# Altium schematic symbol library Schlib1.SchLib: 7 symbols
Pins are listed as number, name and electrical type; pins without a type are passive.

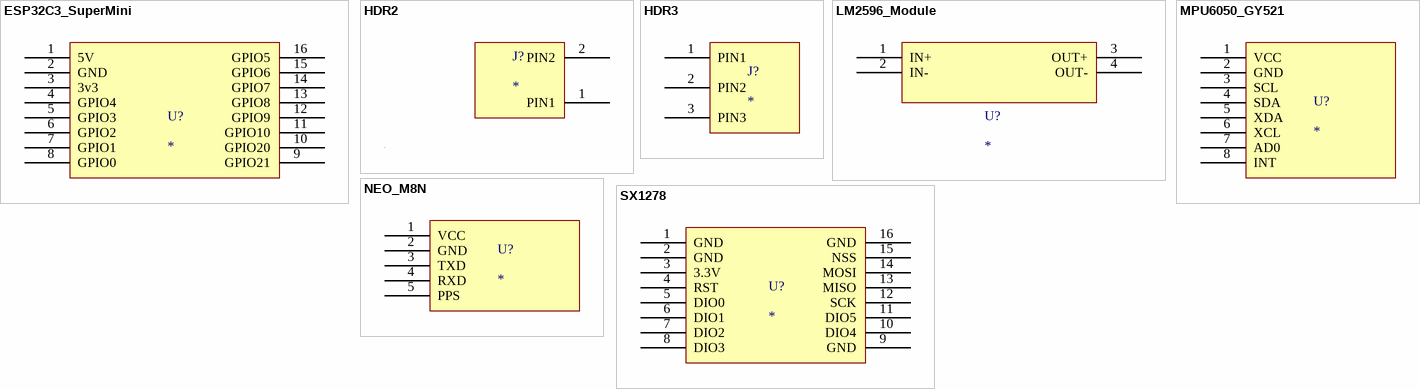
[diagram p0: symbols ESP32C3_SuperMini to SX1278]

## ESP32C3_SuperMini
designator U?
pins: 1 5V, 2 GND, 3 3v3, 4 GPIO4, 5 GPIO3, 6 GPIO2, 7 GPIO1, 8 GPIO0, 9 GPIO21, 10 GPIO20, 11 GPIO10, 12 GPIO9, 13 GPIO8, 14 GPIO7, 15 GPIO6, 16 GPIO5

## HDR2
designator J?
pins: 1 PIN1, 2 PIN2

## HDR3
designator J?
pins: 1 PIN1, 2 PIN2, 3 PIN3

## LM2596_Module
designator U?
pins: 1 IN+, 2 IN-, 3 OUT+, 4 OUT-

## MPU6050_GY521
designator U?
pins: 1 VCC, 2 GND, 3 SCL, 4 SDA, 5 XDA, 6 XCL, 7 AD0, 8 INT

## NEO_M8N
designator U?
pins: 1 VCC, 2 GND, 3 TXD, 4 RXD, 5 PPS

## SX1278
designator U?
pins: 1 GND, 2 GND, 3 3.3V, 4 RST, 5 DIO0, 6 DIO1, 7 DIO2, 8 DIO3, 9 GND, 10 DIO4, 11 DIO5, 12 SCK, 13 MISO, 14 MOSI, 15 NSS, 16 GND